# Altium schematic symbol library MBRS340T3G.SchLib: 1 symbol
Pins are listed as number, name and electrical type; pins without a type are passive.

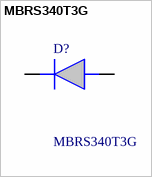
[diagram p0: symbol MBRS340T3G]

## MBRS340T3G
designator D?
Case: Epoxy, Molded; Small Compact Surface Mountable Package with J-Bend Leads; Shipped in 16 mm Tape and Reel, 2500 units per reel; Excellent Ability to Withstand Reverse Avalanche Energy Transients; Rectangular Package for Automated Handling; Highly Stable Oxide Passivated Junction; Guardring for Stress Protection Mechanical Characteristics:; Weight: 217 mg (approximately); Marking: B32, B33, B34; Finish: All External Surfaces Corrosion Resistant and Terminal Leads are Readily Solderable; Polarity: Notch; Manufacturer_Name: onsemi; Geometry.Height: 2.61mm; Manufacturer_Part_Number: MBRS340T3G; Mouser Part Number: 863-MBRS340T3G; Mouser Price/Stock: https://www.mouser.co.uk/ProductDetail/onsemi/MBRS340T3G?qs=3JMERSakeboCr3wxBgfY3w%3D%3D; Arrow Part Number: MBRS340T3G; Arrow Price/Stock: https://www.arrow.com/en/products/mbrs340t3g/on-semiconductor?utm_currency=USD&region=europe; Datasheet Link: https://www.onsemi.com/pub/Collateral/MBRS340T3-D.PDF
footprint DIOM8059X261N
pins: 1 K, 2 A